# Altium footprint library PCB1.PcbLib: 48 footprints (part 3 of 3)
Each footprint in its own frame and in the unit in brackets; x right, y up, seen from the top. Pads: shape width x height; smd on the part's side, far side on the other; paste and mask are expansions set on the pad; w line width, h text height; cw(c..) or ccw(c..) is an arc to the next point about the centre after c.
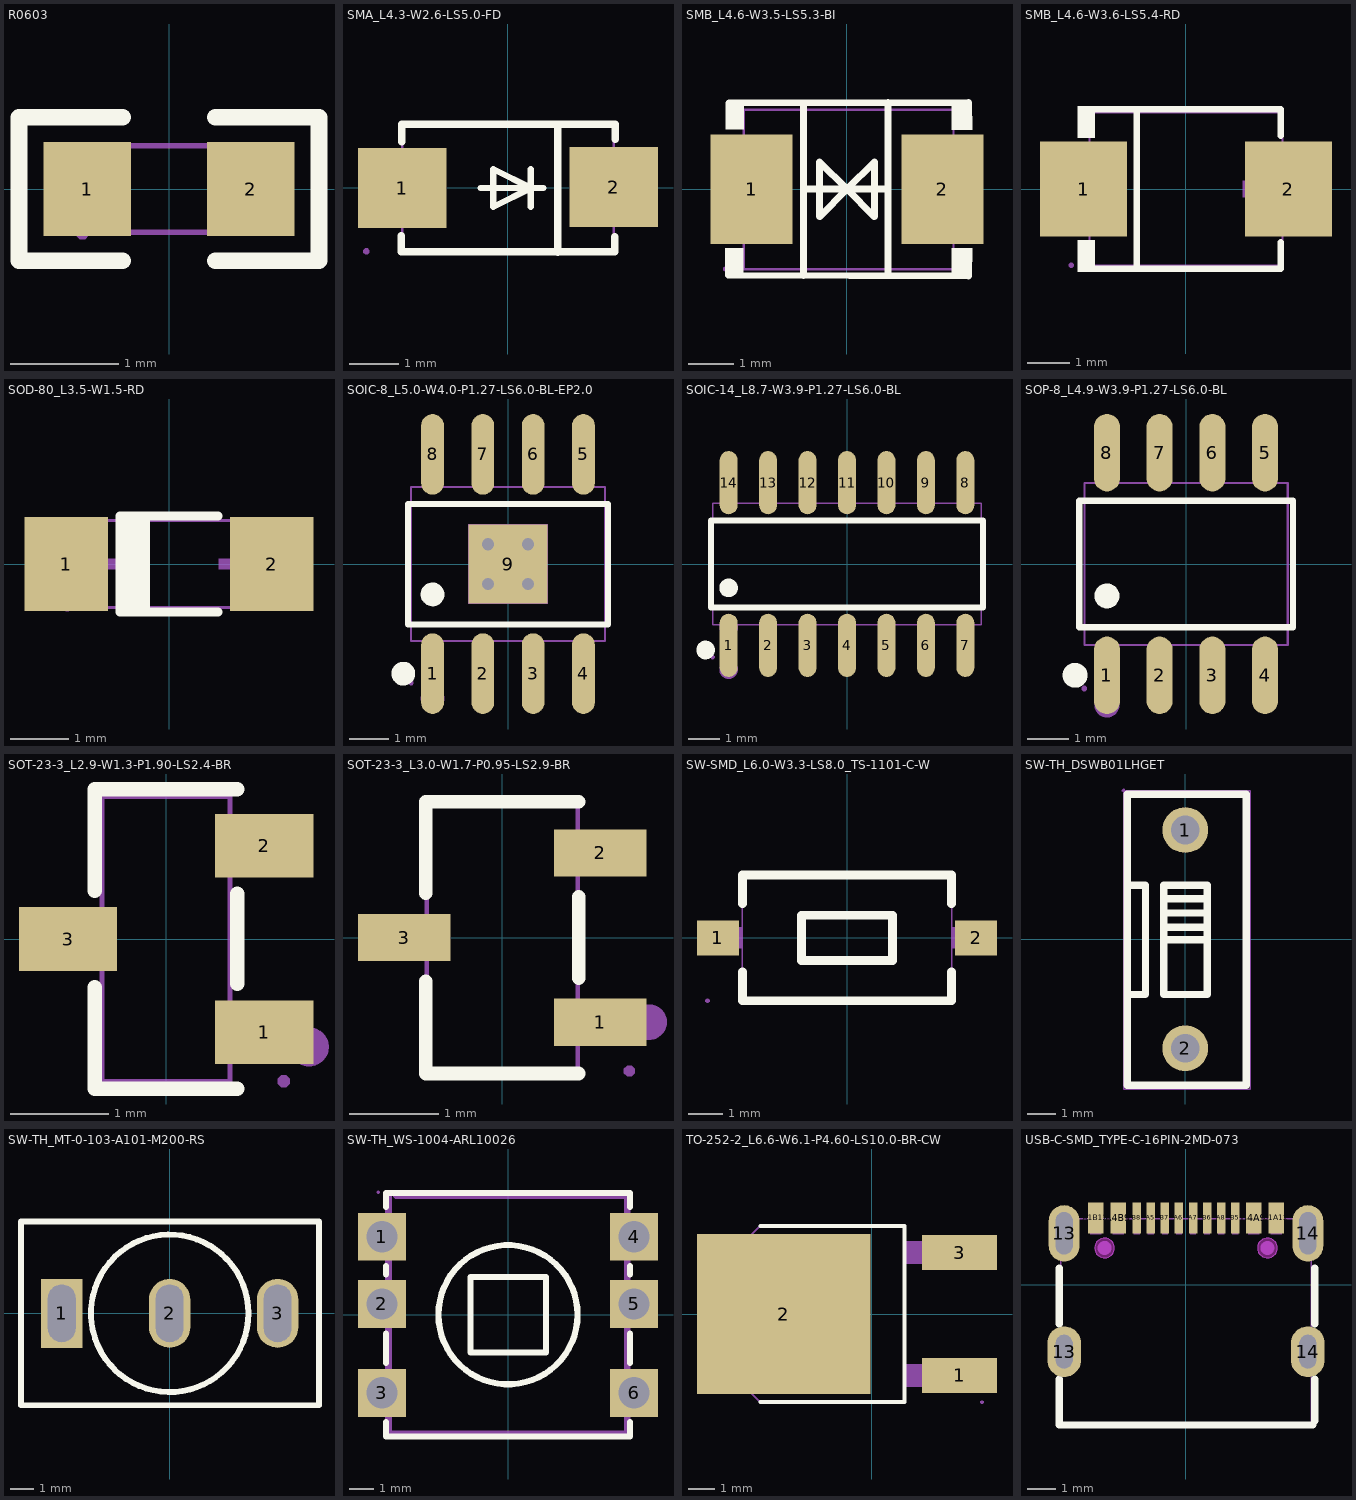
[diagram p2: the footprints below, top view; thin cyan lines are the x and y axes]

## R0603 [mil]
pads (2):
  rect 31.8x34 smd paste-3937 mask+2: 1(-29.7,0) 2(29.7,0)
Top Overlay:
  lines w6: -16.8,-26 -54.5,-26 -54.5,26 -16.8,26 ; 16.8,-26 54.5,-26 54.5,26 16.8,26
Top Paste:
  region: 47.1,17.7 15.6,17.7 13.6,15.7 13.6,6.8 28.2,6.8 28.2,-6.2 13.6,-6.2 13.6,-15.8 15.6,-17.7 47.1,-17.7 49,-15.8 49,15.7
  region: -47,-17.7 -15.5,-17.7 -13.6,-15.8 -13.6,-6.8 -28.1,-6.8 -28.1,6.2 -13.6,6.2 -13.6,15.7 -15.5,17.7 -47,17.7 -49,15.7 -49,-15.8
Mechanical 7:
  lines w2: -31.5,-15.8 -31.5,15.7 31.5,15.7 31.5,-15.8 -31.5,-15.8
Mechanical 8:
  region: -29.1,-15.8 -29.1,-16.79 -30.51,-18.2 -32.49,-18.2 -33.9,-16.79 -33.9,-15.8 -33.9,-14.81 -32.49,-13.4 -30.51,-13.4 -29.1,-14.81 -29.1,-15.8
Mechanical 9:
  region: -31.5,-15.8 -31.5,15.7 -19.7,15.7 -19.7,-15.8
  region: 31.5,-15.8 31.5,15.7 19.7,15.7 19.7,-15.8

## SMA_L4.3-W2.6-LS5.0-FD [mil]
pads (2):
  rect 70.9x63.8 smd: 1(-84.6,-0.4) 2(84.7,0.4)
Top Overlay:
  lines w5: -21.7,-0.4 28.3,-0.4 ; 18.3,-15.4 18.3,-0.4 ; 18.3,14.6 18.3,-0.4 ; 18.3,-0.4 -11.7,14.6 -11.7,-0.4 -11.7,-15.4 18.3,-0.4
  lines w6: -85.4,-38.5 -85.4,-51.5 85.7,-51.5 85.7,-39.3 ; -85,36.6 -85,50.7 86.1,50.7 86.1,38.5 ; 39.7,-52 39.7,50.2
Mechanical 6:
  region: 95.8,3.8 95.8,-3.8 65.3,-3.8 65.3,3.8
  region: -95.7,3.8 -95.7,-3.8 -65.3,-3.8 -65.3,3.8
  region: -84.3,25.3 -84.3,-25.3 -76.7,-25.3 -76.7,25.3
Mechanical 7:
  lines w2: -84.6,-51.2 84.7,-51.2 84.7,51.2 -84.6,51.2 -84.6,-51.2
Mechanical 8:
  region: -110.9,-51.2 -110.9,-52.19 -112.31,-53.6 -114.29,-53.6 -115.7,-52.19 -115.7,-51.2 -115.7,-50.21 -114.29,-48.8 -112.31,-48.8 -110.9,-50.21 -110.9,-51.2 -111,-51.2
Mechanical 9:
  region: -98.4,-28.9 -98.4,28.2 -53.1,28.2 -53.1,-28.9
  region: 98.4,28.9 98.4,-28.2 53.2,-28.2 53.2,28.9

## SMB_L4.6-W3.5-LS5.3-BI [mil]
pads (2):
  rect 70.9x94.5 smd: 1(-82.3,0) 2(82.4,0)
Top Overlay:
  region: -105.3,-74.8 -105.3,-51.2 -89.5,-51.2 -89.5,-74.8
  region: -104.9,75.2 -104.9,51.6 -89.1,51.6 -89.1,75.2
  region: 90.6,74.8 90.6,51.2 108.3,51.2 108,75
  region: 90.6,-74.8 90.6,-51.2 108.3,-51.2 108,-75
  lines w6: -102.3,-74.4 105,-75 ; -102,74.3 104.9,75 ; -37.4,-74.6 -37.4,0 ; -37.4,74.5 -37.4,0 ; -0.1,0 23.5,-23.6 23.7,-23.6 23.7,23.6 0.1,0 ; 0,0 -23.6,23.6 -23.6,-23.6 -23.4,-23.6 0.2,0 ; 35.5,-74.8 35.5,0 ; 35.5,74.7 35.5,0 ; -37.4,0 35.5,0
Mechanical 7:
  lines w2: -89.1,-69.1 -89.1,68.7 92,68.7 92,-69.1 -89.1,-69.1
Mechanical 8:
  region: -101.9,-69.1 -101.9,-70.09 -103.31,-71.5 -105.29,-71.5 -106.7,-70.09 -106.7,-69.1 -106.7,-68.11 -105.29,-66.7 -103.31,-66.7 -101.9,-68.11 -101.9,-69.1
Mechanical 9:
  region: -104.3,40.8 -104.3,-40.9 -59.4,-40.9 -59.4,40.8
  region: 104.3,40.8 104.3,-40.9 59.5,-40.9 59.5,40.8

## SMB_L4.6-W3.6-LS5.4-RD [mil]
pads (2):
  rect 80.6x88.2 smd: 1(-95,0) 2(95,0)
Top Overlay:
  region: -84.6,76.9 -84.6,47.6 -100.4,47.6 -100.4,76.9
  region: -84.6,-76.8 -84.6,-47.5 -100.4,-47.5 -100.4,-76.8
  lines w6: -87.6,-73.8 87.7,-73.8 87.7,-49.5 ; -87.6,73.9 87.7,73.9 87.7,49.6 ; -45.8,-73.8 -45.8,73.9
Mechanical 6:
  region: -125,7.5 -55,7.5 -55,-7.5 -125,-7.5
  region: 52.5,7.5 122.5,7.5 122.5,-7.5 52.5,-7.5
  region: 80,-35 80,35 95,35 95,-35
Mechanical 7:
  lines w2: -89.6,-70.8 89.6,-70.8 89.6,70.9 -89.6,70.9 -89.6,-70.8
Mechanical 8:
  region: -103.9,-70.8 -103.9,-71.79 -105.31,-73.2 -107.29,-73.2 -108.7,-71.79 -108.7,-70.8 -108.7,-69.81 -107.29,-68.4 -105.31,-68.4 -103.9,-69.81 -103.9,-70.8
Mechanical 9:
  region: 106.3,40.4 106.3,-40.3 61.7,-40.3 61.7,40.4
  region: -106.3,40.4 -106.3,-40.3 -61.7,-40.3 -61.7,40.4

## SOD-80_L3.5-W1.5-RD [mil]
pads (2):
  rect 56.7x63.8 smd: 1(-69.5,0) 2(69.4,0)
Top Overlay:
  region: -33.2,31.5 -13.2,31.5 -13.2,-31.5 -33.2,-31.5
  lines w6: 33.1,-32.5 -33.2,-32.5 -33.2,32.5 33.1,32.5
Mechanical 6:
  region: -61.9,-3.5 -61.9,3.6 -33.5,3.6 -33.5,-3.5
  region: 61.8,-3.5 61.8,3.6 33.4,3.6 33.4,-3.5
  region: 51.1,-23.6 51.1,23.6 44,23.6 44,-23.6
Mechanical 7:
  lines w2: -68.9,-29.5 -68.9,29.5 68.9,29.5 68.9,-29.5 -68.9,-29.5
Mechanical 8:
  region: -66.5,-29.5 -66.5,-30.49 -67.91,-31.9 -69.89,-31.9 -71.3,-30.49 -71.3,-29.5 -71.3,-28.51 -69.89,-27.1 -67.91,-27.1 -66.5,-28.51 -66.5,-29.5 -66.6,-29.5
Mechanical 9:
  region: -68.9,-29.5 -68.9,29.5 -50.4,29.5 -50.4,-29.5
  region: 68.9,-29.5 68.9,29.5 50.3,29.5 50.3,-29.5

## SOIC-8_L5.0-W4.0-P1.27-LS6.0-BL-EP2.0 [mil]
pads (9):
  oval 22.6x80.2 smd: 1(-75,-109) 2(-25,-109) 3(25,-109) 4(75,-109) 5(75,109.1) 6(25,109.1) 7(-25,109.1) 8(-75,109.1)
  rect 78.7x78.7 smd: 9(0,0)
via 19.7,-19.7 diameter 24 hole 12
via -19.7,-19.7 diameter 24 hole 12
via -19.7,19.7 diameter 24 hole 12
via 19.7,19.7 diameter 24 hole 12
Top Overlay:
  circle w11.8: c-104.1,-109 r5.9
  circle w11.8: c-75,-30.2 r5.9
  lines w6: -99.4,-59.9 99.5,-59.9 99.5,59.9 -99.4,59.9 -99.4,-59.9
Mechanical 6:
  circle w11.8: c-75,-133.8 r5.9
Mechanical 7:
  lines w2: -96.4,-76.7 96.5,-76.7 96.5,76.8 -96.4,76.8 -96.4,-76.7
Mechanical 8:
  region: -94,-118.1 -94,-119.09 -95.41,-120.5 -97.39,-120.5 -98.8,-119.09 -98.8,-118.1 -98.8,-117.11 -97.39,-115.7 -95.41,-115.7 -94,-117.11 -94,-118.1 -94.1,-118.1
Mechanical 9:
  region: -39.4,-39.3 -39.4,39.4 39.4,39.4 39.4,-39.3
  region: 66.9,118.1 66.9,85.3 83.1,85.3 83.1,118.1
  region: 16.9,118.1 16.9,85.3 33.1,85.3 33.1,118.1
  region: -33.1,118.1 -33.1,85.3 -16.9,85.3 -16.9,118.1
  region: -83.1,118.1 -83.1,85.3 -66.9,85.3 -66.9,118.1
  region: 66.9,-118.1 66.9,-85.2 83.1,-85.2 83.1,-118.1
  region: 16.9,-118.1 16.9,-85.2 33.1,-85.2 33.1,-118.1
  region: -33.1,-118.1 -33.1,-85.2 -16.9,-85.2 -16.9,-118.1
  region: -83.1,-118.1 -83.1,-85.2 -66.9,-85.2 -66.9,-118.1
Mechanical 10:
  region: 66.9,85.7 66.9,76.4 83.1,76.4 83.1,85.7
  region: 16.9,85.7 16.9,76.4 33.1,76.4 33.1,85.7
  region: -33.1,85.7 -33.1,76.4 -16.9,76.4 -16.9,85.7
  region: -83.1,85.7 -83.1,76.4 -66.9,76.4 -66.9,85.7
  region: 66.9,-85.6 66.9,-76.3 83.1,-76.3 83.1,-85.6
  region: 16.9,-85.6 16.9,-76.3 33.1,-76.3 33.1,-85.6
  region: -33.1,-85.6 -33.1,-76.3 -16.9,-76.3 -16.9,-85.6
  region: -83.1,-85.6 -83.1,-76.3 -66.9,-76.3 -66.9,-85.6

## SOIC-14_L8.7-W3.9-P1.27-LS6.0-BL [mil]
pads (14):
  oval 22.6x80.2 smd: 1(-150,-103.1) 2(-100,-103.1) 3(-50,-103.1) 4(0,-103.1) 5(50,-103.1) 6(100,-103.1) 7(150,-103.1) 8(150,103.1) 9(100,103.1) 10(50,103.1) 11(0,103.1) 12(-50,103.1) 13(-100,103.1) 14(-150,103.1)
Top Overlay:
  circle w11.8: c-150,-30.3 r5.9
  circle w11.8: c-179.1,-109 r5.9
  circle w11.8: c-179.1,-109 r5.9
  circle w11.8: c-150,-30.3 r5.9
  lines w7.9: -172.5,-55 -172.5,55 172.5,55 172.5,-55 -172.5,-55
Mechanical 6:
  circle w11.8: c-150,-80.2 r5.9
  circle w11.8: c-150,-133.8 r5.9
Mechanical 7:
  lines w2: -170.3,-76.8 170.2,-76.8 170.2,76.8 -170.3,76.8 -170.3,-76.8
Mechanical 8:
  region: -167.9,-118.1 -167.9,-119.09 -169.31,-120.5 -171.29,-120.5 -172.7,-119.09 -172.7,-118.1 -172.7,-117.11 -171.29,-115.7 -169.31,-115.7 -167.9,-117.11 -167.9,-118.1 -168,-118.1
  region: -167.9,-118.1 -167.9,-119.09 -169.31,-120.5 -171.29,-120.5 -172.7,-119.09 -172.7,-118.1 -172.7,-117.11 -171.29,-115.7 -169.31,-115.7 -167.9,-117.11 -167.9,-118.1 -168,-118.1
Mechanical 9:
  region: 141.9,118.1 141.9,85.2 158,85.2 158,118.1
  region: 91.9,118.1 91.9,85.2 108,85.2 108,118.1
  region: 41.9,118.1 41.9,85.2 58,85.2 58,118.1
  region: -8.1,118.1 -8.1,85.2 8,85.2 8,118.1
  region: -58.1,118.1 -58.1,85.2 -42,85.2 -42,118.1
  region: -108.1,118.1 -108.1,85.2 -92,85.2 -92,118.1
  region: -158.1,118.1 -158.1,85.2 -142,85.2 -142,118.1
  region: 141.9,-118.1 141.9,-85.2 158,-85.2 158,-118.1
  region: 91.9,-118.1 91.9,-85.2 108,-85.2 108,-118.1
  region: 41.9,-118.1 41.9,-85.2 58,-85.2 58,-118.1
  region: -8.1,-118.1 -8.1,-85.2 8,-85.2 8,-118.1
  region: -58.1,-118.1 -58.1,-85.2 -42,-85.2 -42,-118.1
  region: -108.1,-118.1 -108.1,-85.2 -92,-85.2 -92,-118.1
  region: -158.1,-118.1 -158.1,-85.2 -142,-85.2 -142,-118.1
Mechanical 10:
  region: -158.1,-85.6 -158.1,-76.4 -142,-76.4 -142,-85.6
  region: -108.1,-85.6 -108.1,-76.4 -92,-76.4 -92,-85.6
  region: -58.1,-85.6 -58.1,-76.4 -42,-76.4 -42,-85.6
  region: -8.1,-85.6 -8.1,-76.4 8,-76.4 8,-85.6
  region: 41.9,-85.6 41.9,-76.4 58,-76.4 58,-85.6
  region: 91.9,-85.6 91.9,-76.4 108,-76.4 108,-85.6
  region: 141.9,-85.6 141.9,-76.4 158,-76.4 158,-85.6
  region: -158.1,85.6 -158.1,76.4 -142,76.4 -142,85.6
  region: -108.1,85.6 -108.1,76.4 -92,76.4 -92,85.6
  region: -58.1,85.6 -58.1,76.4 -42,76.4 -42,85.6
  region: -8.1,85.6 -8.1,76.4 8,76.4 8,85.6
  region: 41.9,85.6 41.9,76.4 58,76.4 58,85.6
  region: 91.9,85.6 91.9,76.4 108,76.4 108,85.6
  region: 141.9,85.6 141.9,76.4 158,76.4 158,85.6
  region: 141.9,85.6 141.9,76.4 158,76.4 158,85.6
  region: 91.9,85.6 91.9,76.4 108,76.4 108,85.6
  region: 41.9,85.6 41.9,76.4 58,76.4 58,85.6
  region: -8.1,85.6 -8.1,76.4 8,76.4 8,85.6
  region: -58.1,85.6 -58.1,76.4 -42,76.4 -42,85.6
  region: -108.1,85.6 -108.1,76.4 -92,76.4 -92,85.6
  region: -158.1,85.6 -158.1,76.4 -142,76.4 -142,85.6
  region: 141.9,-85.6 141.9,-76.4 158,-76.4 158,-85.6
  region: 91.9,-85.6 91.9,-76.4 108,-76.4 108,-85.6
  region: 41.9,-85.6 41.9,-76.4 58,-76.4 58,-85.6
  region: -8.1,-85.6 -8.1,-76.4 8,-76.4 8,-85.6
  region: -58.1,-85.6 -58.1,-76.4 -42,-76.4 -42,-85.6
  region: -108.1,-85.6 -108.1,-76.4 -92,-76.4 -92,-85.6
  region: -158.1,-85.6 -158.1,-76.4 -142,-76.4 -142,-85.6

## SOP-8_L4.9-W3.9-P1.27-LS6.0-BL [mil]
pads (8):
  oval 24.8x73.4 smd: 1(-75,-105.6) 2(-25,-105.6) 3(25,-105.6) 4(75,-105.6) 5(75,105.6) 6(25,105.6) 7(-25,105.6) 8(-75,105.6)
Top Overlay:
  circle w11.8: c-75,-30.3 r5.9
  circle w11.8: c-105.2,-105.6 r5.9
  lines w6: -101.4,-59.9 -101.4,59.9 101.5,59.9 101.5,-59.9 -101.4,-59.9
Mechanical 6:
  circle w11.8: c-75,-133.8 r5.9
Mechanical 7:
  lines w2: -96.4,-76.8 -96.4,76.8 96.5,76.8 96.5,-76.8 -96.4,-76.8
Mechanical 8:
  region: -94,-118.1 -94,-119.09 -95.41,-120.5 -97.39,-120.5 -98.8,-119.09 -98.8,-118.1 -98.8,-117.11 -97.39,-115.7 -95.41,-115.7 -94,-117.11 -94,-118.1 -94.1,-118.1
Mechanical 9:
  region: 66.6,92.5 66.6,118.1 83.5,118.1 83.5,92.5
  region: 16.6,92.5 16.6,118.1 33.5,118.1 33.5,92.5
  region: -33.4,92.5 -33.4,118.1 -16.5,118.1 -16.5,92.5
  region: -83.4,92.5 -83.4,118.1 -66.5,118.1 -66.5,92.5
  region: 66.6,-118.1 66.6,-92.5 83.5,-92.5 83.5,-118.1
  region: 16.6,-118.1 16.6,-92.5 33.5,-92.5 33.5,-118.1
  region: -33.4,-118.1 -33.4,-92.5 -16.5,-92.5 -16.5,-118.1
  region: -83.4,-118.1 -83.4,-92.5 -66.5,-92.5 -66.5,-118.1
Mechanical 10:
  region: 66.6,76.4 66.6,92.9 83.5,92.9 83.5,76.4
  region: 16.6,76.4 16.6,92.9 33.5,92.9 33.5,76.4
  region: -33.4,76.4 -33.4,92.9 -16.5,92.9 -16.5,76.4
  region: -83.4,76.4 -83.4,92.9 -66.5,92.9 -66.5,76.4
  region: 66.6,-92.9 66.6,-76.4 83.5,-76.4 83.5,-92.9
  region: 16.6,-92.9 16.6,-76.4 33.5,-76.4 33.5,-92.9
  region: -33.4,-92.9 -33.4,-76.4 -16.5,-76.4 -16.5,-92.9
  region: -83.4,-92.9 -83.4,-76.4 -66.5,-76.4 -66.5,-92.9

## SOT-23-3_L2.9-W1.3-P1.90-LS2.4-BR [mil]
pads (3):
  rect 39.4x25.6 smd: 1(39.4,-37.4) 2(39.4,37.4) 3(-39.3,0)
Top Overlay:
  lines w6: -28.6,-19.4 -28.6,-60.1 28.6,-60.1 ; -28.6,19.5 -28.6,60.1 28.6,60.1 ; 28.6,-17.9 28.6,18
Mechanical 6:
  circle w7.9: c57.5,-43.3 r3.9
Mechanical 7:
  lines w2: -25.6,-57.1 -25.6,57.1 25.6,57.1 25.6,-57.1 -25.6,-57.1
Mechanical 8:
  region: 49.7,-57.1 49.7,-58.09 48.29,-59.5 46.31,-59.5 44.9,-58.09 44.9,-57.1 44.9,-56.11 46.31,-54.7 48.29,-54.7 49.7,-56.11 49.7,-57.1 49.6,-57.1
Mechanical 9:
  region: 35.5,29 35.5,45.9 47.3,45.9 47.3,29
  region: 35.5,-45.8 35.5,-28.9 47.3,-28.9 47.3,-45.8
  region: -47.2,-8.4 -47.2,8.5 -35.4,8.5 -35.4,-8.4
Mechanical 10:
  region: 25.2,29 25.2,45.9 35.9,45.9 35.9,29
  region: 25.2,-45.8 25.2,-28.9 35.9,-28.9 35.9,-45.8
  region: -35.8,-8.4 -35.8,8.5 -25.2,8.5 -25.2,-8.4

## SOT-23-3_L3.0-W1.7-P0.95-LS2.9-BR [mil]
pads (3):
  rect 40.8x20.9 smd: 1(43.3,-37.4) 2(43.3,37.4) 3(-43.4,0)
Top Overlay:
  lines w6: -33.8,-19.4 -33.8,-60.1 33.8,-60.1 ; -33.8,19.5 -33.8,60.1 33.8,60.1 ; 33.8,-17.9 33.8,18
Mechanical 6:
  circle w7.9: c64.9,-37.4 r3.9
Mechanical 7:
  lines w2: -33.5,-59 33.4,-59 33.4,59.1 -33.5,59.1 -33.5,-59
Mechanical 8:
  region: 58.5,-59 58.5,-59.99 57.09,-61.4 55.11,-61.4 53.7,-59.99 53.7,-59 53.7,-58.01 55.11,-56.6 57.09,-56.6 58.5,-58.01 58.5,-59 58.4,-59
Mechanical 9:
  region: -56.1,-7.3 -56.1,7.4 -39.4,7.4 -39.4,-7.3
  region: 39.3,30.1 39.3,44.8 56.1,44.8 56.1,30.1
  region: 39.3,-44.7 39.3,-30 56.1,-30 56.1,-44.7
Mechanical 10:
  region: -39.8,-7.3 -39.8,7.4 -32.1,7.4 -32.1,-7.3
  region: 32.1,30.1 32.1,44.8 39.7,44.8 39.7,30.1
  region: 32.1,-44.7 32.1,-30 39.7,-30 39.7,-44.7

## SW-SMD_L6.0-W3.3-LS8.0_TS-1101-C-W [mil]
pads (2):
  rect 47.2x39.4 smd: 1(-145.7,0) 2(145.7,0)
Top Overlay:
  lines w10: -118.1,-38.6 -118.1,-70.9 118.1,-70.9 118.1,-38.6 ; -118.1,38.6 -118.1,70.9 118.1,70.9 118.1,38.6 ; -51.2,-25.6 51.2,-25.6 51.2,25.6 -51.2,25.6 -51.2,-25.6
Mechanical 7:
  lines w2: -118.1,-70.9 -118.1,70.9 118.1,70.9 118.1,-70.9 -118.1,-70.9
Mechanical 8:
  region: -155.1,-70.9 -155.1,-71.89 -156.51,-73.3 -158.49,-73.3 -159.9,-71.89 -159.9,-70.9 -159.9,-69.91 -158.49,-68.5 -156.51,-68.5 -155.1,-69.91 -155.1,-70.9
Mechanical 9:
  region: -157.5,-11.8 -157.5,11.8 -129.9,11.8 -129.9,-11.8
  region: 157.5,11.8 157.5,-11.8 129.9,-11.8 129.9,11.8
Mechanical 10:
  region: -129.9,-11.8 -129.9,11.8 -118.1,11.8 -118.1,-11.8
  region: 129.9,11.8 129.9,-11.8 118.1,-11.8 118.1,11.8

## SW-TH_DSWB01LHGET [mil]
pads (2):
  round 63 hole 39.4: 1(0,150) 2(0,-150)
Top Overlay:
  lines w10: -79.6,74 -54.6,74 -54.6,-76 -79.6,-76 ; -29.9,16.3 25.2,16.3 ; -29.9,36 25.2,36 ; -28.3,-1 26.8,-1 ; -27.6,55.7 27.5,55.7 ; -79.6,-76 -79.6,-201 84,-201 84,199 -79.6,199 -79.6,-76 ; -29.6,-76 30.4,-76 30.4,74 -29.6,74 -29.6,-76
Mechanical 6:
  text "1" at -7,-103.9 h20
Mechanical 7:
  lines w2: -84.6,-206 89,-206 89,204 -84.6,204 -84.6,-206
Mechanical 8:
  region: -82.2,204 -82.2,203.01 -83.61,201.6 -85.59,201.6 -87,203.01 -87,204 -87,204.99 -85.59,206.4 -83.61,206.4 -82.2,204.99 -82.2,204
Mechanical 9:
  region: 15.7,-150 15.7,-153.12 13.31,-158.89 8.89,-163.31 3.12,-165.7 -3.12,-165.7 -8.89,-163.31 -13.31,-158.89 -15.7,-153.12 -15.7,-150 -15.7,-146.88 -13.31,-141.11 -8.89,-136.69 -3.12,-134.3 3.12,-134.3 8.89,-136.69 13.31,-141.11 15.7,-146.88 15.7,-150 15.8,-150
  region: 15.7,150 15.7,146.88 13.31,141.11 8.89,136.69 3.12,134.3 -3.12,134.3 -8.89,136.69 -13.31,141.11 -15.7,146.88 -15.7,150 -15.7,153.12 -13.31,158.89 -8.89,163.31 -3.12,165.7 3.12,165.7 8.89,163.31 13.31,158.89 15.7,153.12 15.7,150 15.8,150

## SW-TH_MT-0-103-A101-M200-RS [mil]
pads (3):
  rect 70.9x118.1 hole 47.2 slot 98.4 at 90 deg: 1(-185,0)
  oval 70.9x118.1 hole 47.2 slot 98.4 at 90 deg: 2(0,0) 3(185.1,0)
Top Overlay:
  circle w10: c0,0 r135
  lines w10: -255,-157.5 255.9,-157.5 255.9,157.5 -255,157.5 -255,-157.5
Mechanical 7:
  lines w2: -255.9,-157.5 255.9,-157.5 255.9,157.5 -255.9,157.5 -255.9,-157.5
Mechanical 8:
  region: -253.5,-157.5 -253.5,-158.49 -254.91,-159.9 -256.89,-159.9 -258.3,-158.49 -258.3,-157.5 -258.3,-156.51 -256.89,-155.1 -254.91,-155.1 -253.5,-156.51 -253.5,-157.5
Mechanical 9:
  region: 169.3,39.3 200.8,39.3 200.8,-39.4 169.3,-39.4
  region: -200.8,39.3 -169.3,39.3 -169.3,-39.4 -200.8,-39.4
  region: -15.7,39.3 15.8,39.3 15.8,-39.4 -15.7,-39.4

## SW-TH_WS-1004-ARL10026 [mil]
pads (6):
  rect 78.7x78.7 hole 51.2: 1(-206.7,127.9) 2(-206.7,17.7) 3(-206.7,-128) 4(206.7,127.9) 5(206.7,17.7) 6(206.7,-128)
Top Overlay:
  circle w10: c0,0 r114.2
  lines w10: -200,-176.4 -200,-200 200,-200 200,-176.4 ; -200,-79.5 -200,-30.8 ; -200,66.2 -200,79.5 ; -200,176.4 -200,200 200,200 200,176.4 ; 200,-79.5 200,-30.8 ; 200,66.2 200,79.5 ; -61.8,-62.2 62.2,-62.2 62.2,61.8 -61.8,61.8 -61.8,-62.2
Mechanical 6:
  region: -190.3,195.3 -190.3,-190.3 190.3,-190.3 190.3,190.3 -183.1,190.3 -185.17,190.3 -188.1,193.23 -188.1,197.37 -185.17,200.3 -183.1,200.3 195.3,200.3 196.29,200.3 198.13,199.54 199.54,198.13 200.3,196.29 200.3,195.3 200.3,-195.3 200.3,-196.29 199.54,-198.13 198.13,-199.54 196.29,-200.3 195.3,-200.3 -195.3,-200.3 -196.29,-200.3 -198.13,-199.54 -199.54,-198.13 -200.3,-196.29 -200.3,-195.3 -200.3,195.3 -200.3,197.37 -197.37,200.3 -193.23,200.3 -190.3,197.37 -190.3,195.3
Mechanical 7:
  lines w2: -200.8,-200.8 -200.8,200.8 200.8,200.8 200.8,-200.8 -200.8,-200.8
Mechanical 8:
  region: -210.2,200.8 -210.2,199.81 -211.61,198.4 -213.59,198.4 -215,199.81 -215,200.8 -215,201.79 -213.59,203.2 -211.61,203.2 -210.2,201.79 -210.2,200.8
Mechanical 9:
  region: -212.6,114.2 -212.6,141.7 -200.8,141.7 -200.8,114.2
  region: -212.6,3.9 -212.6,31.5 -200.8,31.5 -200.8,3.9
  region: -212.6,-141.7 -212.6,-114.2 -200.8,-114.2 -200.8,-141.7
  region: 212.6,-114.2 212.6,-141.7 200.8,-141.7 200.8,-114.2
  region: 212.6,31.5 212.6,3.9 200.8,3.9 200.8,31.5
  region: 212.6,141.7 212.6,114.2 200.8,114.2 200.8,141.7
Mechanical 10:
  region: -212.6,114.2 -212.6,141.7 -200.4,141.7 -200.4,114.2
  region: -212.6,3.9 -212.6,31.5 -200.4,31.5 -200.4,3.9
  region: -212.6,-141.7 -212.6,-114.2 -200.4,-114.2 -200.4,-141.7
  region: 212.6,-114.2 212.6,-141.7 200.4,-141.7 200.4,-114.2
  region: 212.6,31.5 212.6,3.9 200.4,3.9 200.4,31.5
  region: 212.6,141.7 212.6,114.2 200.4,114.2 200.4,141.7

## TO-252-2_L6.6-W6.1-P4.60-LS10.0-BR-CW [mil]
pads (3):
  rect 110.2x51.2 smd: 1(129.6,-90.5) 3(129.6,90.6)
  rect 255.9x236.2 smd: 2(-129.6,0)
Top Overlay:
  lines w6: -164.2,-129.9 48.4,-129.9 48.4,129.9 -164.2,129.9
Mechanical 6:
  circle w15.7: c153,-90.5 r7.9
Mechanical 7:
  lines w2: -191.7,-102.3 -164.2,-129.9 48.4,-129.9 48.4,129.9 -164.2,129.9 -191.7,102.4 -191.7,-102.3
Mechanical 8:
  region: 165,-129.9 165,-130.89 163.59,-132.3 161.61,-132.3 160.2,-130.89 160.2,-129.9 160.2,-128.91 161.61,-127.5 163.59,-127.5 165,-128.91 165,-129.9
Mechanical 9:
  region: -22.4,-102.3 -231.1,-102.3 -231.1,102.4 -22.4,102.4
  region: 105.5,107.3 162.6,107.3 162.6,73.8 105.5,73.8
  region: 105.5,-73.8 162.6,-73.8 162.6,-107.3 105.5,-107.3
Mechanical 10:
  region: 105.9,107.3 105.9,73.8 48,73.8 48,107.3
  region: 105.9,-73.8 105.9,-107.3 48,-107.3 48,-73.8

## USB-C-SMD_TYPE-C-16PIN-2MD-073 [mil]
pads (16):
  oval 47.2x70.9 hole 23.6 slot 47.2 at 90 deg paste-99999 mask+2: 13(-170.2,-93.5) 14(170.3,-93.5)
  oval 43.3x78.7 hole 23.6 slot 59.1 at 90 deg paste-99999 mask+2: 13(-170.2,71.9) 14(170.3,71.9)
  rect 21.7x43.3 smd paste-3937 mask+2: A1B12(-125.9,93.5) A4B9(-94.4,93.5) B1A12(126,93.5) B4A9(94.5,93.5)
  rect 11.8x43.3 smd paste-3937 mask+2: A5(-49.2,93.5) A6(-9.8,93.5) A7(9.9,93.5) A8(49.3,93.5) B5(68.9,93.5) B6(29.6,93.5) B7(-29.5,93.5) B8(-68.9,93.5)
Top Overlay:
  lines w10: -177.1,-132.1 -177.1,-195.9 177.2,-195.9 ; -177.1,-54.9 -177.1,23.4 ; 180,-190 180,-132 ; 180,-55 180,23.5
Top Paste:
  drawing of 16 lines, arcs and shapes, not listed
Keep-Out Layer:
  circle w0.1: c113.8,51.4 r13.8
  circle w0.1: c-113.7,51.4 r13.8
  region: 127.6,51.4 127.6,48.66 125.5,43.58 121.62,39.7 116.54,37.6 111.06,37.6 105.98,39.7 102.1,43.58 100,48.66 100,51.4 100,54.14 102.1,59.22 105.98,63.1 111.06,65.2 116.54,65.2 121.62,63.1 125.5,59.22 127.6,54.14 127.6,51.4
  region: 127.6,51.4 127.6,48.66 125.5,43.58 121.62,39.7 116.54,37.6 111.06,37.6 105.98,39.7 102.1,43.58 100,48.66 100,51.4 100,54.14 102.1,59.22 105.98,63.1 111.06,65.2 116.54,65.2 121.62,63.1 125.5,59.22 127.6,54.14 127.6,51.4
  region: -99.9,51.4 -99.9,48.66 -102,43.58 -105.88,39.7 -110.96,37.6 -116.44,37.6 -121.52,39.7 -125.4,43.58 -127.5,48.66 -127.5,51.4 -127.5,54.14 -125.4,59.22 -121.52,63.1 -116.44,65.2 -110.96,65.2 -105.88,63.1 -102,59.22 -99.9,54.14 -99.9,51.4 -100,51.4
  region: -99.9,51.4 -99.9,48.66 -102,43.58 -105.88,39.7 -110.96,37.6 -116.44,37.6 -121.52,39.7 -125.4,43.58 -127.5,48.66 -127.5,51.4 -127.5,54.14 -125.4,59.22 -121.52,63.1 -116.44,65.2 -110.96,65.2 -105.88,63.1 -102,59.22 -99.9,54.14 -99.9,51.4 -100,51.4
Mechanical 1:
  circle w0.1: c113.8,51.4 r13.8
  circle w0.1: c-113.7,51.4 r13.8
Mechanical 6:
  circle w9.8: c113.8,51.4 r4.9
  circle w9.8: c-113.7,51.4 r4.9
Mechanical 7:
  lines w2: -175.2,-196.9 175.2,-196.9 175.2,92.5 -175.2,92.5 -175.2,-196.9
Mechanical 8:
  region: -172.8,104.3 -172.8,103.31 -174.21,101.9 -176.19,101.9 -177.6,103.31 -177.6,104.3 -177.6,105.29 -176.19,106.7 -174.21,106.7 -172.8,105.29 -172.8,104.3
Mechanical 9:
  region: 165.4,-79.7 175.2,-79.7 175.2,-107.3 165.4,-107.3
  region: -175.2,-79.7 -165.3,-79.7 -165.3,-107.3 -175.2,-107.3
  region: 165.4,92.5 175.2,92.5 175.2,49.2 165.4,49.2
  region: -175.2,92.5 -165.3,92.5 -165.3,49.2 -175.2,49.2
  region: 118.2,104.3 133.9,104.3 133.9,70.8 118.2,70.8
  region: 86.7,104.3 102.4,104.3 102.4,70.8 86.7,70.8
  region: -102.3,104.3 -86.6,104.3 -86.6,70.8 -102.3,70.8
  region: -133.8,104.3 -118.1,104.3 -118.1,70.8 -133.8,70.8
  region: 65,104.3 72.9,104.3 72.9,70.8 65,70.8
  region: 45.3,104.3 53.2,104.3 53.2,70.8 45.3,70.8
  region: 25.6,104.3 33.5,104.3 33.5,70.8 25.6,70.8
  region: 5.9,104.3 13.8,104.3 13.8,70.8 5.9,70.8
  region: -13.7,104.3 -5.9,104.3 -5.9,70.8 -13.7,70.8
  region: -53.1,104.3 -45.2,104.3 -45.2,70.8 -53.1,70.8
  region: -33.4,104.3 -25.5,104.3 -25.5,70.8 -33.4,70.8
  region: -72.8,104.3 -64.9,104.3 -64.9,70.8 -72.8,70.8